# Altium footprint library TC2030-IDC.PcbLib: 1 footprints
Each footprint in its own frame and in the unit in brackets; x right, y up, seen from the top. Pads: shape width x height; smd on the part's side, far side on the other; paste and mask are expansions set on the pad; w line width, h text height; cw(c..) or ccw(c..) is an arc to the next point about the centre after c.
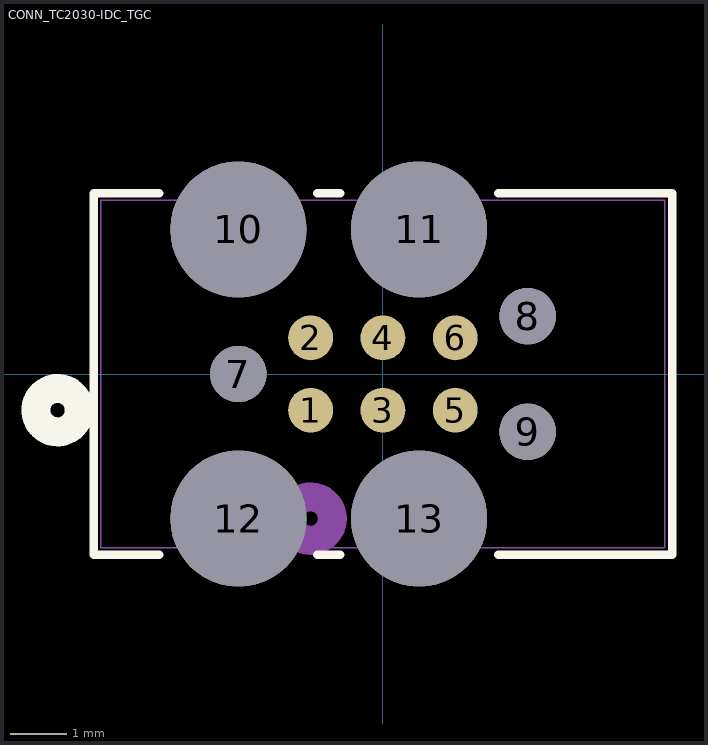
[diagram p0: the footprint, top view; thin cyan lines are the x and y axes]

## CONN_TC2030-IDC_TGC [mil]
pads (13):
  round 31 smd paste-15.5 mask+0: 1(-50,-25) 2(-50,25) 3(0,-25) 4(0,25) 5(50,-25) 6(50,25)
  round 39 hole 39 unplated paste-99999 mask+0: 7(-100,0) 8(100,40) 9(100,-40)
  round 94 hole 94 unplated paste-99999 mask+0: 10(-100,100) 11(25,100) 12(-100,-100) 13(25,-100)
Top Overlay:
  circle w20: c-225,-25 r15
  lines w6: -154.65,-125 -200,-125 -200,125 -154.65,125 ; -45.35,-125 -29.65,-125 ; -45.35,125 -29.65,125 ; 79.65,-125 200,-125 200,125 79.65,125
  text ".Designator" at -137.5,-25 h50
Bottom Overlay:
  circle w20: c-225,-25 r15
Mechanical 13:
  circle w20: c-50,-100 r15
  lines w1: -195,-120 -195,120 195,120 195,-120 -195,-120
  text ".Designator" at -137.5,-25 h50